# Altium footprint library TitansLib.PcbLib: 333 footprints (part 8 of 21)
Each footprint in its own frame and in the unit in brackets; x right, y up, seen from the top. Pads: shape width x height; smd on the part's side, far side on the other; paste and mask are expansions set on the pad; w line width, h text height; cw(c..) or ccw(c..) is an arc to the next point about the centre after c.
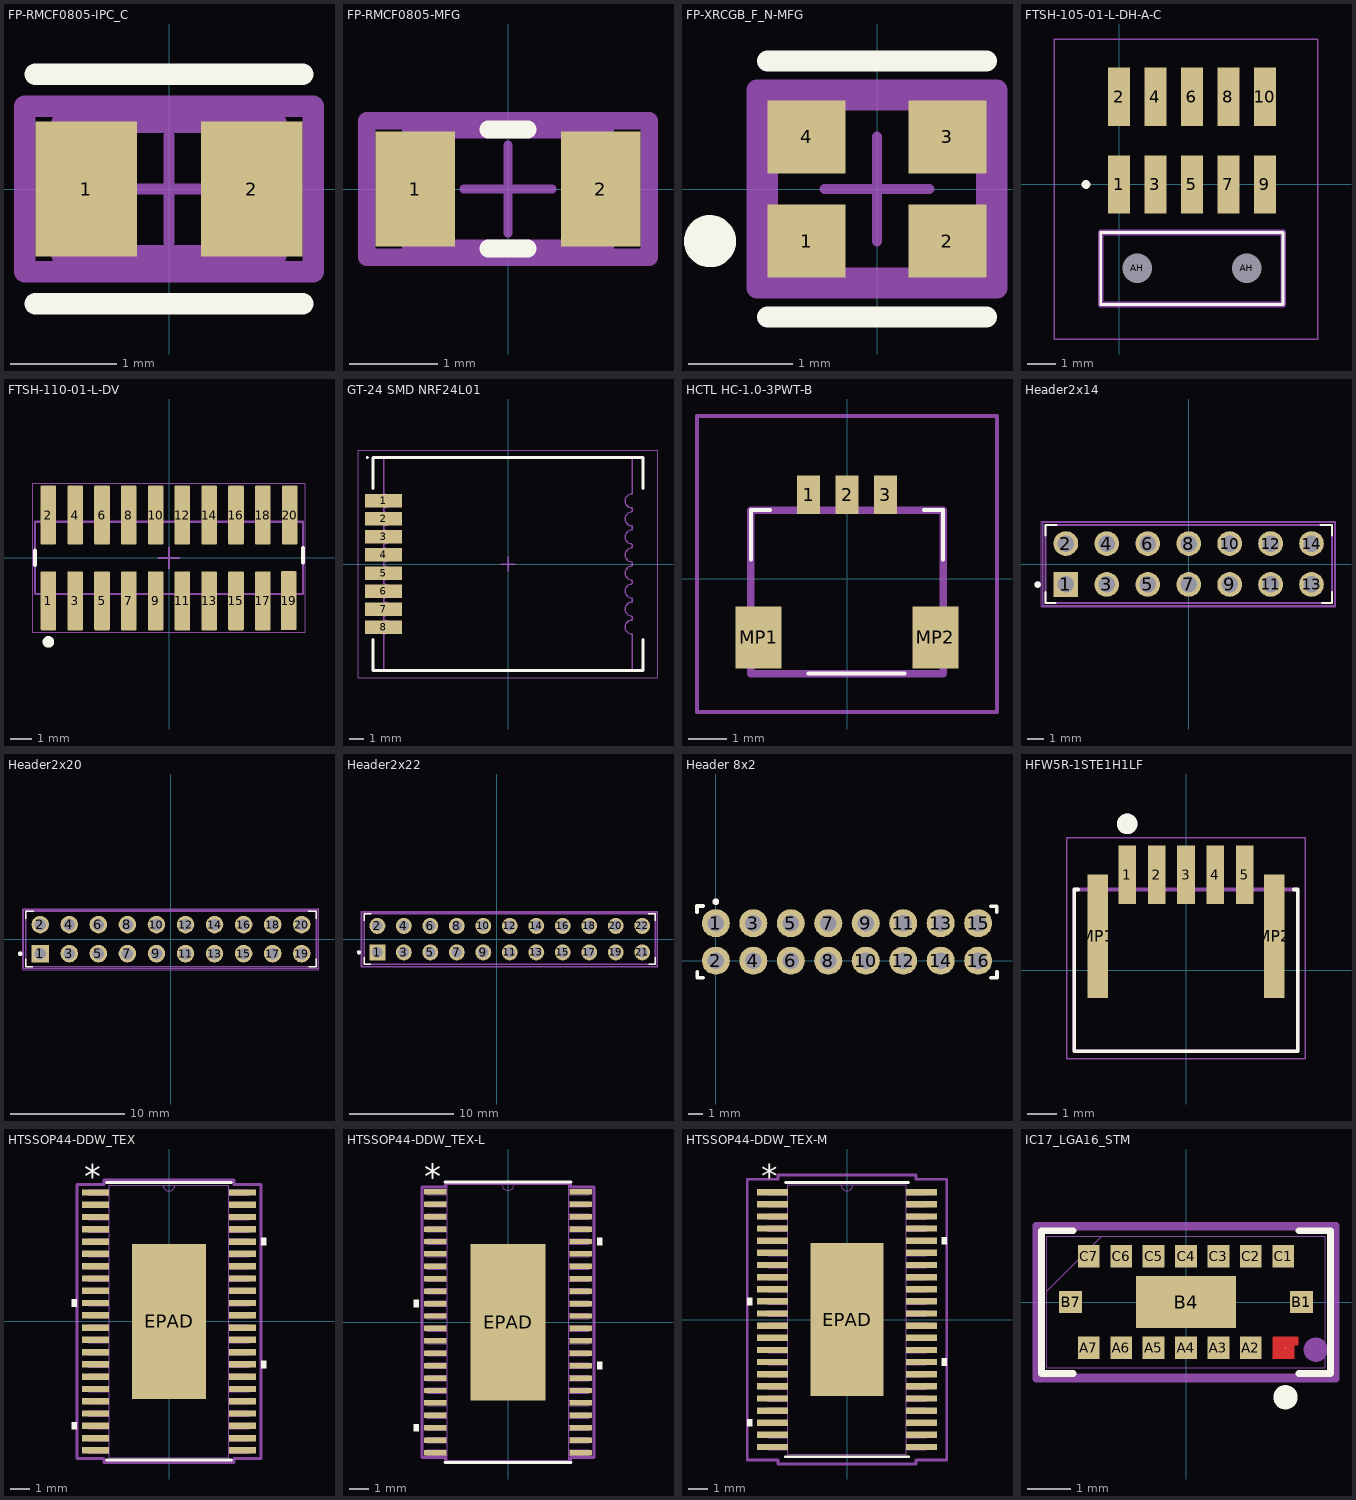
[diagram p7: the footprints below, top view; thin cyan lines are the x and y axes]

## FP-RMCF0805-IPC_C [mm]
pads (2):
  rect 0.955x1.262 smd paste+0 mask+0: 1(-0.776,0) 2(0.776,0)
Top Overlay:
  lines w0.2: -1.253,-1.075 1.253,-1.075 ; -1.253,1.075 1.253,1.075
Top 3D Body:
  lines w0.2: -1,-0.625 -1,0.625 1,0.625 1,-0.625 -1,-0.625
Top Courtyard:
  lines w0.2: -1.353,-0.775 -1.353,0.775 1.353,0.775 1.353,-0.775 -1.353,-0.775
Top Component Center:
  lines w0.1: -0.5,0 0.5,0 ; 0,-0.5 0,0.5
Top Assembly:
  lines w0.2: -1.353,-0.775 -1.353,0.775 1.353,0.775 1.353,-0.775 -1.353,-0.775
  text ".Designator" at 0,0.188 h1
3D body "Res_Stackpole_Electronics_RMCF0805JT220K_eec.STEP": height 0.25, standoff 0, extent -1.353,-0.775 1.353,0.775

## FP-RMCF0805-MFG [mm]
pads (2):
  rect 0.9x1.3 smd paste+0 mask+0: 1(-1.05,0) 2(1.05,0)
Top Overlay:
  lines w0.2: -0.225,-0.675 0.225,-0.675 ; -0.225,0.675 0.225,0.675
Top 3D Body:
  lines w0.2: -1.1,-0.675 -1.1,0.675 1.1,0.675 1.1,-0.675 -1.1,-0.675
Top Courtyard:
  lines w0.2: -1.6,-0.775 -1.6,0.775 1.6,0.775 1.6,-0.775 -1.6,-0.775
Top Component Center:
  lines w0.1: -0.5,0 0.5,0 ; 0,-0.5 0,0.5
Top Assembly:
  lines w0.2: -1.6,-0.775 -1.6,0.775 1.6,0.775 1.6,-0.775 -1.6,-0.775
  text ".Designator" at 0,0.188 h1
3D body "Res_Stackpole_Electronics_RMCF0805JT220K_eec.STEP": height 0.25, standoff 0, extent -1.6,-0.775 1.6,0.775

## FP-XRCGB_F_N-MFG [mm]
pads (4):
  rect 0.75x0.7 smd paste+0 mask+0: 1(-0.675,-0.5) 2(0.675,-0.5) 3(0.675,0.5) 4(-0.675,0.5)
Top Overlay:
  circle w0.25: c-1.6,-0.5 r0.125
  lines w0.2: -1.05,-1.225 1.05,-1.225 ; -1.05,1.225 1.05,1.225
Top 3D Body:
  lines w0.2: -1.05,-0.85 1.05,-0.85 1.05,0.85 -1.05,0.85 -1.05,-0.85
Top Courtyard:
  lines w0.2: -1.15,-0.95 1.15,-0.95 1.15,0.95 -1.15,0.95 -1.15,-0.95
Top Component Center:
  lines w0.1: -0.5,0 0.5,0 ; 0,-0.5 0,0.5
Top Assembly:
  lines w0.2: -1.15,-0.95 1.15,-0.95 1.15,0.95 -1.15,0.95 -1.15,-0.95
3D body "Crys_Murata_XRCGB24M000F3M00R0_eec.STEP": height 0.25, standoff 0, extent -1.15,-0.95 1.15,0.95

## FTSH-105-01-L-DH-A-C [mm]
pads (12):
  rect 0.76x2.03 smd: 1(0,0) 2(0,3.05) 3(1.27,0) 4(1.27,3.05) 5(2.54,0) 6(2.54,3.05) 7(3.81,0) 8(3.81,3.05) 9(5.08,0) 10(5.08,3.05)
  round 0.51 hole 1.02 unplated: AH(0.635,-2.921) AH(4.445,-2.921)
Top Overlay:
  circle w0.2: c-1.15,0 r0.05
  lines w0.1: -0.635,-4.18 -0.635,-1.67 5.715,-1.67 5.715,-4.18 -0.635,-4.18
Mechanical 13:
  lines w0.2: -0.635,-4.18 -0.635,-1.67 5.715,-1.67 5.715,-4.18 -0.635,-4.18
Mechanical 15:
  circle w0.013: c4.445,-2.921 r0.445
  circle w0.013: c0.635,-2.921 r0.445
  circle w0.013: c4.445,-2.921 r0.445
  lines w0.01: 0.635,-2.921 1.079,-2.921 ; 4.445,-2.921 4.889,-2.921
  lines w0.013: -0.635,-4.178 -0.635,-1.664 5.715,-1.664 5.715,-4.178 -0.635,-4.178
  lines w0.05: -2.25,-5.38 -2.25,5.065 6.915,5.065 6.915,-5.38 -2.25,-5.38
3D body "FTSH-105-01-L-DH-A-C.stp": height 3.52, standoff -1.05, extent -0.635,-7.233 5.715,3.664

## FTSH-110-01-L-DV [mm] "CONN, 20-Leads, Body 12.7x3.43mm, Pitch 1.27mm"
height 6.1
pads (20):
  rrect13% 0.74x2.79 smd: 1(-5.715,-2.035) 2(-5.715,2.035) 3(-4.445,-2.035) 4(-4.445,2.035) 5(-3.175,-2.035) 6(-3.175,2.035) 7(-1.905,-2.035) 8(-1.905,2.035) 9(-0.635,-2.035) 10(-0.635,2.035) 11(0.635,-2.035) 12(0.635,2.035) 13(1.905,-2.035) 14(1.905,2.035) 15(3.175,-2.035) 16(3.175,2.035) 17(4.445,-2.035) 18(4.445,2.035) 19(5.675,-2.025) 20(5.715,2.035)
Top Overlay:
  circle w0.3: c-5.715,-3.98 r0.125
  lines w0.2: -6.35,-0.341 -6.35,0.341 ; 6.35,-0.214 6.35,0.468
Mechanical 13:
  lines w0.1: -6.35,-1.715 6.35,-1.715 6.35,1.715 -6.35,1.715 -6.35,-1.715
Mechanical 15:
  lines w0.05: -6.45,-3.53 6.45,-3.53 6.45,3.53 -6.45,3.53 -6.45,-3.53
  lines w0.1: -0.5,0 0.5,0 ; 0,-0.5 0,0.5
3D body "FTSH-110-01-L-DV.stp": height 5.97, standoff 0, extent -6.35,-2.921 6.35,2.921

## GT-24 SMD NRF24L01 [mm] "Chip Array, Concave, 16-Leads, Pitch 1,27mm,  Body 14,75x18,65mm,  IPC Low Density"
height 1.4
pads (8):
  rect 2.6x0.95 smd: 1(-8.75,4.445) 2(-8.75,3.175) 3(-8.75,1.905) 4(-8.75,0.635) 5(-8.75,-0.635) 6(-8.75,-1.905) 7(-8.75,-3.175) 8(-8.75,-4.445)
Top Overlay:
  circle w0.1: c-9.9,7.5 r0.05
  lines w0.2: -9.5,-5.32 -9.5,-7.5 9.5,-7.5 9.5,-5.32 ; -9.5,5.32 -9.5,7.5 9.5,7.5 9.5,5.32
Top Courtyard:
  lines w0.05: -10.555,-8 -10.555,8 10.555,8 10.555,-8 -10.555,-8
  lines w0.1: -0.5,0 0.5,0 ; 0,-0.5 0,0.5
Top Assembly:
  lines w0.1: -8.75,-7.5 -8.75,-4.945 ccw(c-8.75,-4.445) -8.75,-3.945 -8.75,-3.675 ccw(c-8.75,-3.175) -8.75,-2.675 -8.75,-2.405 ccw(c-8.75,-1.905) -8.75,-1.405 -8.75,-1.135 ccw(c-8.75,-0.635) -8.75,-0.135 -8.75,0.135 ccw(c-8.75,0.635) -8.75,1.135 -8.75,1.405 ccw(c-8.75,1.905) -8.75,2.405 -8.75,2.675 ccw(c-8.75,3.175) -8.75,3.675 -8.75,3.945 ccw(c-8.75,4.445) -8.75,4.945 -8.75,7.5 8.75,7.5 8.75,4.945 ccw(c8.75,4.445) 8.75,3.945 8.75,3.675 ccw(c8.75,3.175) 8.75,2.675 8.75,2.405 ccw(c8.75,1.905) 8.75,1.405 8.75,1.135 ccw(c8.75,0.635) 8.75,0.135 8.75,-0.135 ccw(c8.75,-0.635) 8.75,-1.135 8.75,-1.405 ccw(c8.75,-1.905) 8.75,-2.405 8.75,-2.675 ccw(c8.75,-3.175) 8.75,-3.675 8.75,-3.945 ccw(c8.75,-4.445) 8.75,-4.945 8.75,-7.5 -8.75,-7.5
3D body "GT-24 SMD NRF24L01.step": height 1.4, standoff 0, extent -9.55,-7.5 9.55,7.5

## HCTL HC-1.0-3PWT-B [mm]
pads (5):
  rect 0.6x1 smd: 1(-1,2.188) 2(0,2.188) 3(1,2.188)
  rect 1.2x1.6 smd: MP1(-2.3,-1.524) MP2(2.3,-1.524)
Top Overlay:
  lines w0.1: -2.5,0.5 -2.5,1.787 -2,1.787 ; -1,-2.463 1.5,-2.463 ; 2,1.787 2.5,1.787 2.5,0.5
Mechanical 13:
  lines w0.2: -2.5,-2.463 2.5,-2.463 2.5,1.787 -2.5,1.787 -2.5,-2.463
Mechanical 15:
  lines w0.1: -3.9,-3.463 3.9,-3.463 3.9,4.237 -3.9,4.237 -3.9,-3.463
3D body "SM03B-SRSS-TB_LF__SN_.stp": height 2.96, standoff 0, extent -2.5,-2.463 2.5,2.487

## Header2x14 [mm]
pads (14):
  rect 1.53x1.53 / inner round 1.53 / far side rect 1.53x1.53 hole 1.02: 1(-7.62,-1.27)
  round 1.53 hole 1.02: 2(-7.62,1.27) 3(-5.08,-1.27) 4(-5.08,1.27) 5(-2.54,-1.27) 6(-2.54,1.27) 7(0,-1.27) 8(0,1.27) 9(2.54,-1.27) 10(2.54,1.27) 11(5.08,-1.27) 12(5.08,1.27) 13(7.62,-1.27) 14(7.62,1.27)
Top Overlay:
  circle w0.2: c-9.375,-1.275 r0.1
  lines w0.127: -8.89,-1.726 -8.89,-2.415 -8.258,-2.415 ; -8.881,1.783 -8.881,2.415 -8.192,2.415 ; 8.194,2.415 8.884,2.415 8.884,1.783 ; 8.258,-2.415 8.89,-2.415 8.89,-1.726
Top Assembly:
  lines w0.1: -9.063,-2.588 9.063,-2.588 9.063,2.588 -9.063,2.588 -9.063,-2.588
  text ".Designator" at -2.154,0.797 h1
Mechanical 13:
  circle w0.2: c-9.375,-1.275 r0.1
  lines w0.127: -8.89,-2.415 -8.89,2.415 ; -8.89,-2.415 -8.89,2.415 ; -8.89,-2.415 8.89,-2.415 ; -8.89,2.415 8.89,2.415 ; -8.89,2.415 8.89,2.415 ; 8.89,-2.415 8.89,2.415 ; 8.89,-2.415 8.89,2.415
Mechanical 15:
  lines w0.05: -9.14,-2.665 9.14,-2.665 9.14,2.665 -9.14,2.665 -9.14,-2.665

## Header2x20 [mm]
pads (20):
  rect 1.53x1.53 / inner round 1.53 / far side rect 1.53x1.53 hole 1.02: 1(-11.43,-1.27)
  round 1.53 hole 1.02: 2(-11.43,1.27) 3(-8.89,-1.27) 4(-8.89,1.27) 5(-6.35,-1.27) 6(-6.35,1.27) 7(-3.81,-1.27) 8(-3.81,1.27) 9(-1.27,-1.27) 10(-1.27,1.27) 11(1.27,-1.27) 12(1.27,1.27) 13(3.81,-1.27) 14(3.81,1.27) 15(6.35,-1.27) 16(6.35,1.27) 17(8.89,-1.27) 18(8.89,1.27) 19(11.43,-1.27) 20(11.43,1.27)
Top Overlay:
  circle w0.2: c-13.185,-1.275 r0.1
  lines w0.127: -12.7,-1.726 -12.7,-2.415 -12.068,-2.415 ; -12.691,1.783 -12.691,2.415 -12.002,2.415 ; 12.001,2.416 12.69,2.416 12.69,1.784 ; 12.064,-2.414 12.696,-2.414 12.696,-1.725
Top Assembly:
  lines w0.1: -12.873,-2.567 12.863,-2.567 12.863,2.588 -12.873,2.588 -12.873,-2.567
  text ".Designator" at -6.5,0.038 h1
Mechanical 13:
  circle w0.2: c-13.185,-1.275 r0.1
  lines w0.127: -12.7,2.024 -12.7,-2.415 ; 12.69,2.415 -12.7,2.415 -12.7,-2.415 ; 12.696,-2.415 -12.7,-2.415 ; 12.69,-2.394 12.69,2.436 12.69,-2.394
Mechanical 15:
  lines w0.05: 12.94,-2.665 -12.95,-2.665 -12.95,2.665 12.94,2.665 ; 12.94,-2.644 12.94,2.686

## Header2x22 [mm]
pads (22):
  rect 1.53x1.53 / inner round 1.53 / far side rect 1.53x1.53 hole 1.02: 1(-11.43,-1.27)
  round 1.53 hole 1.02: 2(-11.43,1.27) 3(-8.89,-1.27) 4(-8.89,1.27) 5(-6.35,-1.27) 6(-6.35,1.27) 7(-3.81,-1.27) 8(-3.81,1.27) 9(-1.27,-1.27) 10(-1.27,1.27) 11(1.27,-1.27) 12(1.27,1.27) 13(3.81,-1.27) 14(3.81,1.27) 15(6.35,-1.27) 16(6.35,1.27) 17(8.89,-1.27) 18(8.89,1.27) 19(11.43,-1.27) 20(11.43,1.27) 21(13.97,-1.27) 22(13.97,1.27)
Top Overlay:
  circle w0.2: c-13.185,-1.275 r0.1
  lines w0.127: -12.7,-1.726 -12.7,-2.415 -12.068,-2.415 ; -12.691,1.783 -12.691,2.415 -12.002,2.415 ; 14.541,2.416 15.23,2.416 15.23,1.784 ; 14.604,-2.414 15.236,-2.414 15.236,-1.725
Top Assembly:
  lines w0.1: -12.873,-2.588 15.403,-2.588 15.403,2.552 -12.873,2.552 -12.873,-2.588
  text ".Designator" at -1.45,-0.087 h1
Mechanical 13:
  circle w0.2: c-13.185,-1.275 r0.1
  lines w0.127: -12.7,2.024 -12.7,-2.415 ; 15.23,-2.394 15.23,2.436 ; 15.23,2.415 -12.7,2.415 -12.7,-2.415 ; 15.236,-2.415 -12.7,-2.415
Mechanical 15:
  lines w0.05: 15.48,-2.665 -12.95,-2.665 -12.95,2.665 15.48,2.665 ; 15.48,-2.644 15.48,2.686

## Header 8x2 [mm]
pads (16):
  round 1.9 hole 1.1: 1(0,2.54) 2(0,0) 3(2.54,2.54) 4(2.54,0) 5(5.08,2.54) 6(5.08,0) 7(7.62,2.54) 8(7.62,0) 9(10.16,2.54) 10(10.16,0) 11(12.7,2.54) 12(12.7,0) 13(15.24,2.54) 14(15.24,0) 15(17.78,2.54) 16(17.78,0)
Top Overlay:
  circle w0.25: c0,4 r0.1
  lines w0.25: -1.275,3.3 -1.269,3.7 ; -1.27,3.7 -0.87,3.7 ; -1.26,-1.145 -1.26,-0.745 ; -1.26,-1.144 -0.86,-1.15 ; 18.64,3.69 19.04,3.684 ; 18.65,-1.16 19.05,-1.16 ; 19.04,3.285 19.04,3.685 ; 19.049,-1.16 19.055,-0.76
Top Designator:
  text ".Designator" at 4.182,0.754 h2.5
3D body "s10129381-X16001XLF.stp": height 1.4, standoff -10.03, extent -1.295,-1.167 19.025,3.667

## HFW5R-1STE1H1LF [mm]
height 2
pads (7):
  rrect0% 0.6x2 smd: 1(-2,3.25) 2(-1,3.25) 3(0,3.25) 4(1,3.25) 5(2,3.25)
  rrect0% 0.7x4.2 smd: MP1(-3,1.15) MP2(3,1.15)
Top Overlay:
  circle w0.4: c-2,4.977 r0.15
  lines w0.127: -3.67,2.75 -3.8,2.75 -3.8,-2.75 3.8,-2.75 3.8,2.75 3.67,2.75
Mechanical 13:
  circle w0.4: c-2,4.977 r0.15
  lines w0.127: -3.8,-2.75 -3.8,2.75 3.8,2.75 3.8,-2.75 -3.8,-2.75
Mechanical 15:
  lines w0.05: -4.05,-3 4.05,-3 4.05,4.5 -4.05,4.5 -4.05,-3
3D body "step_temp.STEP": height 1.95, standoff -0.08, extent -3.8,-2.721 3.8,3.81

## HTSSOP44-DDW_TEX [mil]
pads (45):
  rect 55.5x13 smd paste+0 mask+0: 1(-149.75,262.5) 2(-149.75,237.5) 3(-149.75,212.5) 4(-149.75,187.5) 5(-149.75,162.5) 6(-149.75,137.5) 7(-149.75,112.5) 8(-149.75,87.5) 9(-149.75,62.5) 10(-149.75,37.5) 11(-149.75,12.5) 12(-149.75,-12.5) 13(-149.75,-37.5) 14(-149.75,-62.5) 15(-149.75,-87.5) 16(-149.75,-112.5) 17(-149.75,-137.5) 18(-149.75,-162.5) 19(-149.75,-187.5) 20(-149.75,-212.5) 21(-149.75,-237.5) 22(-149.75,-262.5) 23(149.75,-262.5) 24(149.75,-237.5) 25(149.75,-212.5) 26(149.75,-187.5) 27(149.75,-162.5) 28(149.75,-137.5) 29(149.75,-112.5) 30(149.75,-87.5) 31(149.75,-62.5) 32(149.75,-37.5) 33(149.75,-12.5) 34(149.75,12.5) 35(149.75,37.5) 36(149.75,62.5) 37(149.75,87.5) 38(149.75,112.5) 39(149.75,137.5) 40(149.75,162.5) 41(149.75,187.5) 42(149.75,212.5) 43(149.75,237.5) 44(149.75,262.5)
  rect 150x315 smd paste-157 mask+0: EPAD(0,0)
Top Overlay:
  region: 187.5,170 197.5,170 197.5,155 187.5,155
  region: 187.5,-80 197.5,-80 197.5,-95 187.5,-95
  region: -187.5,-205 -197.5,-205 -197.5,-220 -187.5,-220
  region: -187.5,45 -197.5,45 -197.5,30 -187.5,30
  lines w6: -127,-282.5 127,-282.5 ; -127,282.5 127,282.5
  text ".Designator" at -137.5,-25 h50
  text "*" at -172.25,270.5 h50
Top Paste:
  region: 71.06,-108.94 28.94,-108.94 28.94,-153.56 71.06,-153.56
  region: 71.06,-56.44 28.94,-56.44 28.94,-101.06 71.06,-101.06
  region: 71.06,-3.94 28.94,-3.94 28.94,-48.56 71.06,-48.56
  region: 71.06,48.56 28.94,48.56 28.94,3.94 71.06,3.94
  region: 71.06,101.06 28.94,101.06 28.94,56.44 71.06,56.44
  region: 71.06,153.56 28.94,153.56 28.94,108.94 71.06,108.94
  region: 21.06,-108.94 -21.06,-108.94 -21.06,-153.56 21.06,-153.56
  region: 21.06,-56.44 -21.06,-56.44 -21.06,-101.06 21.06,-101.06
  region: 21.06,-3.94 -21.06,-3.94 -21.06,-48.56 21.06,-48.56
  region: 21.06,48.56 -21.06,48.56 -21.06,3.94 21.06,3.94
  region: 21.06,101.06 -21.06,101.06 -21.06,56.44 21.06,56.44
  region: 21.06,153.56 -21.06,153.56 -21.06,108.94 21.06,108.94
  region: -28.94,-108.94 -71.06,-108.94 -71.06,-153.56 -28.94,-153.56
  region: -28.94,-56.44 -71.06,-56.44 -71.06,-101.06 -28.94,-101.06
  region: -28.94,-3.94 -71.06,-3.94 -71.06,-48.56 -28.94,-48.56
  region: -28.94,48.56 -71.06,48.56 -71.06,3.94 -28.94,3.94
  region: -28.94,101.06 -71.06,101.06 -71.06,56.44 -28.94,56.44
  region: -28.94,153.56 -71.06,153.56 -71.06,108.94 -28.94,108.94
Mechanical 13:
  drawing of 181 lines, arcs and shapes, not listed
  text "*" at -119.5,224.5 h50
  text ".Designator" at -137.5,-25 h50
Mechanical 15:
  lines w6: -187.5,-279 -132,-279 -132,-287.5 132,-287.5 132,-279 187.5,-279 187.5,279 132,279 132,287.5 -132,287.5 -132,279 -187.5,279 -187.5,-279
3D body "HTSSOP44-DDW_TEX.step": height 47.09, standoff 0, extent -163.5,-277.48 163.5,277.48

## HTSSOP44-DDW_TEX-L [mil]
pads (45):
  rect 46x11 smd paste+0 mask+0: 1(-146.5,262.5) 2(-146.5,237.5) 3(-146.5,212.5) 4(-146.5,187.5) 5(-146.5,162.5) 6(-146.5,137.5) 7(-146.5,112.5) 8(-146.5,87.5) 9(-146.5,62.5) 10(-146.5,37.5) 11(-146.5,12.5) 12(-146.5,-12.5) 13(-146.5,-37.5) 14(-146.5,-62.5) 15(-146.5,-87.5) 16(-146.5,-112.5) 17(-146.5,-137.5) 18(-146.5,-162.5) 19(-146.5,-187.5) 20(-146.5,-212.5) 21(-146.5,-237.5) 22(-146.5,-262.5) 23(146.5,-262.5) 24(146.5,-237.5) 25(146.5,-212.5) 26(146.5,-187.5) 27(146.5,-162.5) 28(146.5,-137.5) 29(146.5,-112.5) 30(146.5,-87.5) 31(146.5,-62.5) 32(146.5,-37.5) 33(146.5,-12.5) 34(146.5,12.5) 35(146.5,37.5) 36(146.5,62.5) 37(146.5,87.5) 38(146.5,112.5) 39(146.5,137.5) 40(146.5,162.5) 41(146.5,187.5) 42(146.5,212.5) 43(146.5,237.5) 44(146.5,262.5)
  rect 150x315 smd paste-157 mask+0: EPAD(0,0)
Top Overlay:
  region: -179.5,45 -189.5,45 -189.5,30 -179.5,30
  region: -179.5,-205 -189.5,-205 -189.5,-220 -179.5,-220
  region: 179.5,-80 189.5,-80 189.5,-95 179.5,-95
  region: 179.5,170 189.5,170 189.5,155 179.5,155
  lines w6: -127,-282.5 127,-282.5 ; -127,282.5 127,282.5
  text "*" at -169,268.5 h50
  text ".Designator" at -137.5,-25 h50
Top Paste:
  region: -28.94,153.56 -71.06,153.56 -71.06,108.94 -28.94,108.94
  region: -28.94,101.06 -71.06,101.06 -71.06,56.44 -28.94,56.44
  region: -28.94,48.56 -71.06,48.56 -71.06,3.94 -28.94,3.94
  region: -28.94,-3.94 -71.06,-3.94 -71.06,-48.56 -28.94,-48.56
  region: -28.94,-56.44 -71.06,-56.44 -71.06,-101.06 -28.94,-101.06
  region: -28.94,-108.94 -71.06,-108.94 -71.06,-153.56 -28.94,-153.56
  region: 21.06,153.56 -21.06,153.56 -21.06,108.94 21.06,108.94
  region: 21.06,101.06 -21.06,101.06 -21.06,56.44 21.06,56.44
  region: 21.06,48.56 -21.06,48.56 -21.06,3.94 21.06,3.94
  region: 21.06,-3.94 -21.06,-3.94 -21.06,-48.56 21.06,-48.56
  region: 21.06,-56.44 -21.06,-56.44 -21.06,-101.06 21.06,-101.06
  region: 21.06,-108.94 -21.06,-108.94 -21.06,-153.56 21.06,-153.56
  region: 71.06,153.56 28.94,153.56 28.94,108.94 71.06,108.94
  region: 71.06,101.06 28.94,101.06 28.94,56.44 71.06,56.44
  region: 71.06,48.56 28.94,48.56 28.94,3.94 71.06,3.94
  region: 71.06,-3.94 28.94,-3.94 28.94,-48.56 71.06,-48.56
  region: 71.06,-56.44 28.94,-56.44 28.94,-101.06 71.06,-101.06
  region: 71.06,-108.94 28.94,-108.94 28.94,-153.56 71.06,-153.56
Mechanical 13:
  drawing of 181 lines, arcs and shapes, not listed
  text ".Designator" at -137.5,-25 h50
  text "*" at -119.5,224.5 h50
Mechanical 15:
  lines w6: -173.5,-272 -173.5,272 -126,272 -126,281.5 126,281.5 126,272 173.5,272 173.5,-272 126,-272 126,-281.5 -126,-281.5 -126,-272 -173.5,-272
3D body "HTSSOP44-DDW_TEX.step": height 47.09, standoff 0, extent -163.5,-277.48 163.5,277.48

## HTSSOP44-DDW_TEX-M [mil]
pads (45):
  rect 63.5x13 smd paste+0 mask+0: 1(-153.75,262.5) 2(-153.75,237.5) 3(-153.75,212.5) 4(-153.75,187.5) 5(-153.75,162.5) 6(-153.75,137.5) 7(-153.75,112.5) 8(-153.75,87.5) 9(-153.75,62.5) 10(-153.75,37.5) 11(-153.75,12.5) 12(-153.75,-12.5) 13(-153.75,-37.5) 14(-153.75,-62.5) 15(-153.75,-87.5) 16(-153.75,-112.5) 17(-153.75,-137.5) 18(-153.75,-162.5) 19(-153.75,-187.5) 20(-153.75,-212.5) 21(-153.75,-237.5) 22(-153.75,-262.5) 23(153.75,-262.5) 24(153.75,-237.5) 25(153.75,-212.5) 26(153.75,-187.5) 27(153.75,-162.5) 28(153.75,-137.5) 29(153.75,-112.5) 30(153.75,-87.5) 31(153.75,-62.5) 32(153.75,-37.5) 33(153.75,-12.5) 34(153.75,12.5) 35(153.75,37.5) 36(153.75,62.5) 37(153.75,87.5) 38(153.75,112.5) 39(153.75,137.5) 40(153.75,162.5) 41(153.75,187.5) 42(153.75,212.5) 43(153.75,237.5) 44(153.75,262.5)
  rect 150x315 smd paste-157 mask+0: EPAD(0,0)
Top Overlay:
  region: -195.5,45 -205.5,45 -205.5,30 -195.5,30
  region: -195.5,-205 -205.5,-205 -205.5,-220 -195.5,-220
  region: 195.5,-80 205.5,-80 205.5,-95 195.5,-95
  region: 195.5,170 205.5,170 205.5,155 195.5,155
  lines w6: -127,-282.5 127,-282.5 ; -127,282.5 127,282.5
  text "*" at -176.25,270.5 h50
  text ".Designator" at -137.5,-25 h50
Top Paste:
  region: -28.94,153.56 -71.06,153.56 -71.06,108.94 -28.94,108.94
  region: -28.94,101.06 -71.06,101.06 -71.06,56.44 -28.94,56.44
  region: -28.94,48.56 -71.06,48.56 -71.06,3.94 -28.94,3.94
  region: -28.94,-3.94 -71.06,-3.94 -71.06,-48.56 -28.94,-48.56
  region: -28.94,-56.44 -71.06,-56.44 -71.06,-101.06 -28.94,-101.06
  region: -28.94,-108.94 -71.06,-108.94 -71.06,-153.56 -28.94,-153.56
  region: 21.06,153.56 -21.06,153.56 -21.06,108.94 21.06,108.94
  region: 21.06,101.06 -21.06,101.06 -21.06,56.44 21.06,56.44
  region: 21.06,48.56 -21.06,48.56 -21.06,3.94 21.06,3.94
  region: 21.06,-3.94 -21.06,-3.94 -21.06,-48.56 21.06,-48.56
  region: 21.06,-56.44 -21.06,-56.44 -21.06,-101.06 21.06,-101.06
  region: 21.06,-108.94 -21.06,-108.94 -21.06,-153.56 21.06,-153.56
  region: 71.06,153.56 28.94,153.56 28.94,108.94 71.06,108.94
  region: 71.06,101.06 28.94,101.06 28.94,56.44 71.06,56.44
  region: 71.06,48.56 28.94,48.56 28.94,3.94 71.06,3.94
  region: 71.06,-3.94 28.94,-3.94 28.94,-48.56 71.06,-48.56
  region: 71.06,-56.44 28.94,-56.44 28.94,-101.06 71.06,-101.06
  region: 71.06,-108.94 28.94,-108.94 28.94,-153.56 71.06,-153.56
Mechanical 13:
  drawing of 181 lines, arcs and shapes, not listed
  text ".Designator" at -137.5,-25 h50
  text "*" at -119.5,224.5 h50
Mechanical 15:
  lines w6: -205.5,-289 -205.5,289 -142,289 -142,297.5 142,297.5 142,289 205.5,289 205.5,-289 142,-289 142,-297.5 -142,-297.5 -142,-289 -205.5,-289
3D body "HTSSOP44-DDW_TEX.step": height 47.09, standoff 0, extent -163.5,-277.48 163.5,277.48

## IC17_LGA16_STM [mm]
pads (17):
  round 0.025 smd mask+0.051: A1(2.3,-1.058)
  rect 0.5x0.515 smd paste+0 mask+0.051: A2(1.5,-1.058) A3(0.75,-1.058) A4(0,-1.058) A5(-0.75,-1.058) A6(-1.5,-1.058) A7(-2.25,-1.058) C1(2.25,1.058) C2(1.5,1.058) C3(0.75,1.058) C4(0,1.058) C5(-0.75,1.058) C6(-1.5,1.058) C7(-2.25,1.058)
  rect 0.535x0.5 smd paste+0 mask+0.051: B1(2.668,0) B7(-2.668,0)
  rect 2.316x1.2 smd paste+0 mask+0.051: B4(0,0)
Top Layer:
  region: 2,-1.315 2,-0.8 2.6,-0.8 2.6,-1 2.5,-1 2.5,-1.315
Top Overlay:
  circle w0.3: c2.3,-2.2 r0.13
  lines w0.152: -2.603,-1.651 -3.34,-1.651 -3.34,1.651 -2.603,1.651 ; 2.603,-1.651 3.34,-1.651 3.34,1.651 2.603,1.651
Mechanical 1:
  circle w0.3: c3,-1.1 r0.13
Top Assembly:
  lines w0.1: -3.39,-1.701 3.39,-1.701 3.39,1.701 -3.39,1.701 -3.39,-1.701
  text ".Designator" at -2.4,0.269 h1
Mechanical 13:
  lines w0.025: -3.213,0.254 -1.943,1.524 ; -3.213,-1.524 -3.213,1.524 3.213,1.524 3.213,-1.524 -3.213,-1.524
Mechanical 15:
  lines w0.152: -3.467,-1.778 -3.467,-0.519 -3.467,0.519 -3.467,1.778 -2.769,1.778 2.769,1.778 3.467,1.778 3.467,0.519 3.467,-0.519 3.467,-1.778 2.769,-1.778 -2.769,-1.778 -3.467,-1.778
3D body "VL53L8 3D Model.step": height 4.76, standoff 0.01, extent -3.819,-2.198 4.379,1.999